# Altium integrated library MMBT3906.IntLib: 1 symbol
Pins are listed as number, name and electrical type; pins without a type are passive.

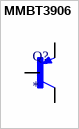
[diagram p0: symbol MMBT3906]

## MMBT3906
designator Q?
Bipolar (BJT) Transistor PNP 40 V 200 mA 300MHz 200 mW Surface Mount SOT-23; MF: MDD; MP: MMBT3906; SnapEDA_Link: https://www.snapeda.com/parts/MMBT3906/MDD/view-part/?ref=snap; Package: None; Value: *; Check_prices: https://www.snapeda.com/parts/MMBT3906/MDD/view-part/?ref=eda
footprint SOT95P260X140-3N
pins: 1 B, 2 E, 3 C